# Altium footprint library HDR-F_1x08_P2.54mm_THT_Vertical_H8.5mm.PcbLib: 1 footprints
Each footprint in its own frame and in the unit in brackets; x right, y up, seen from the top. Pads: shape width x height; smd on the part's side, far side on the other; paste and mask are expansions set on the pad; w line width, h text height; cw(c..) or ccw(c..) is an arc to the next point about the centre after c.
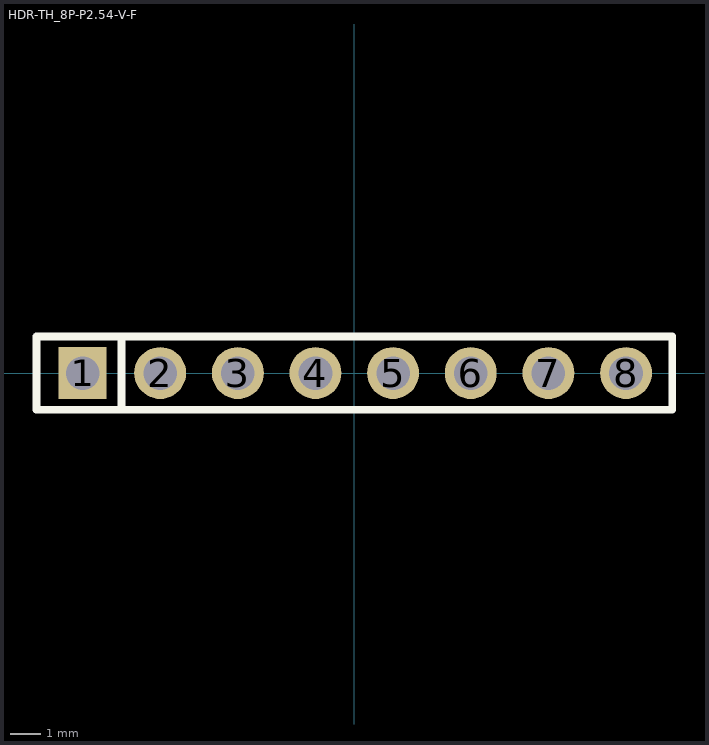
[diagram p0: the footprint, top view; thin cyan lines are the x and y axes]

## HDR-TH_8P-P2.54-V-F [mm]
pads (8):
  rect 1.575x1.7 hole 1.1: 1(-8.89,0)
  round 1.7 hole 1.1: 2(-6.35,0) 3(-3.81,0) 4(-1.27,0) 5(1.27,0) 6(3.81,0) 7(6.35,0) 8(8.89,0)
Top Overlay:
  lines w0.254: -7.62,-1.143 -7.62,1.143 ; -10.4,-1.2 10.4,-1.2 10.4,1.2 -10.4,1.2 -10.4,-1.2
Mechanical 7:
  lines w0.051: -10.36,-1.2 10.36,-1.2 10.36,1.2 -10.36,1.2 -10.36,-1.2
Mechanical 8:
  region: -10.3,-1.2 -10.3,-1.225 -10.335,-1.26 -10.385,-1.26 -10.42,-1.225 -10.42,-1.2 -10.42,-1.175 -10.385,-1.14 -10.335,-1.14 -10.3,-1.175 -10.3,-1.2
Mechanical 9:
  region: -9.19,-0.2 -9.19,0.2 -8.59,0.2 -8.59,-0.2
  region: -6.65,0.2 -6.05,0.2 -6.05,-0.2 -6.65,-0.2
  region: -4.11,0.2 -3.51,0.2 -3.51,-0.2 -4.11,-0.2
  region: -1.57,0.2 -0.97,0.2 -0.97,-0.2 -1.57,-0.2
  region: 0.97,0.2 1.57,0.2 1.57,-0.2 0.97,-0.2
  region: 3.51,0.2 4.11,0.2 4.11,-0.2 3.51,-0.2
  region: 6.05,0.2 6.65,0.2 6.65,-0.2 6.05,-0.2
  region: 8.59,0.2 9.19,0.2 9.19,-0.2 8.59,-0.2